# Altium footprint library WR-TBL_Pluggable Connector_3.50mm.PcbLib: 175 footprints (part 8 of 11)
Each footprint in its own frame and in the unit in brackets; x right, y up, seen from the top. Pads: shape width x height; smd on the part's side, far side on the other; paste and mask are expansions set on the pad; w line width, h text height; cw(c..) or ccw(c..) is an arc to the next point about the centre after c.
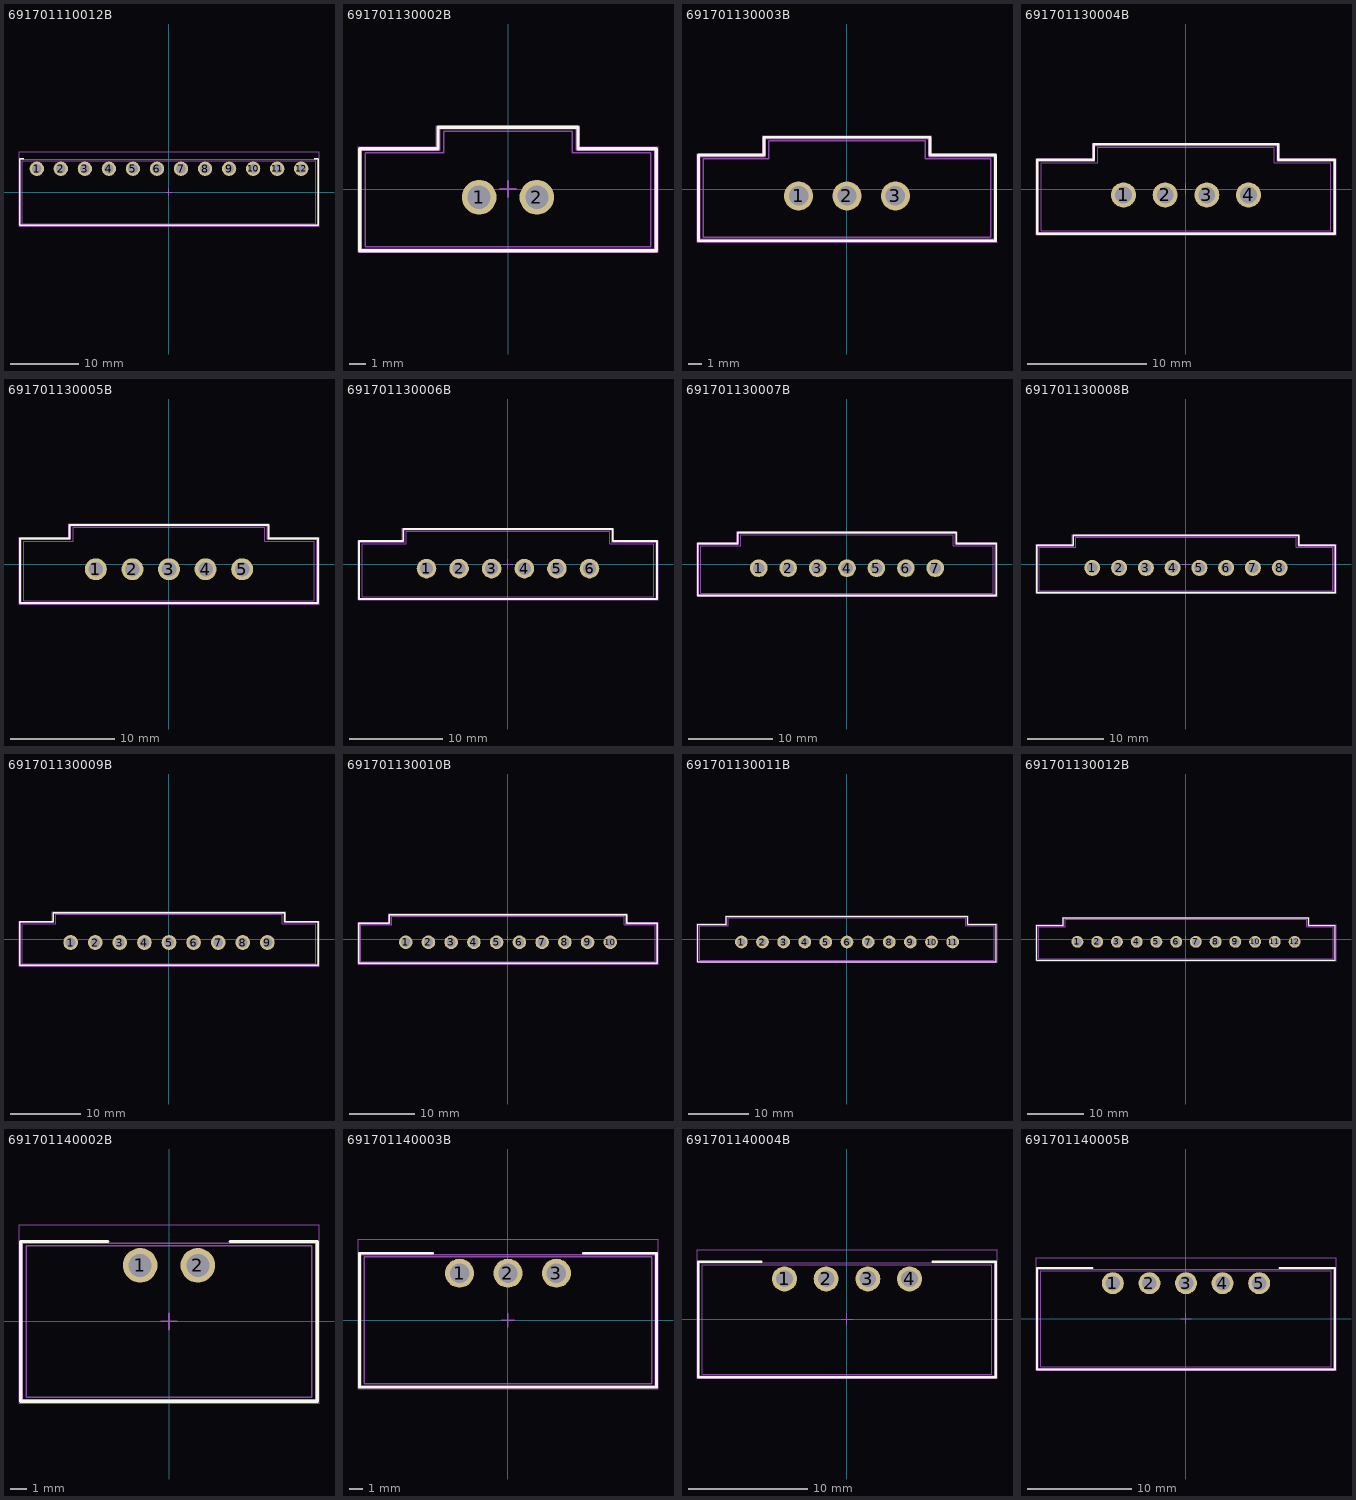
[diagram p7: the footprints below, top view; thin cyan lines are the x and y axes]

## 691701110012B [mm] "3.50 mm Horizontal PCB Header THR type, 12p"
height 7
pads (12):
  round 2.1 hole 1.4: 1(-19.25,3.4) 2(-15.75,3.4) 3(-12.25,3.4) 4(-8.75,3.4) 5(-5.25,3.4) 6(-1.75,3.4) 7(1.75,3.4) 8(5.25,3.4) 9(8.75,3.4) 10(12.25,3.4) 11(15.75,3.4) 12(19.25,3.4)
Top Overlay:
  lines w0.2: -21.15,4.85 -21.75,4.85 -21.75,-4.85 21.75,-4.85 21.75,4.85 21.15,4.85
Top Paste:
  region: 17.7,5.65 20.8,5.65 20.8,1.15 17.7,1.15
  region: 14.2,5.65 17.3,5.65 17.3,1.15 14.2,1.15
  region: 10.7,5.65 13.8,5.65 13.8,1.15 10.7,1.15
  region: 7.2,5.65 10.3,5.65 10.3,1.15 7.2,1.15
  region: 3.7,5.65 6.8,5.65 6.8,1.15 3.7,1.15
  region: 0.2,5.65 3.3,5.65 3.3,1.15 0.2,1.15
  region: -3.3,5.65 -0.2,5.65 -0.2,1.15 -3.3,1.15
  region: -6.8,5.65 -3.7,5.65 -3.7,1.15 -6.8,1.15
  region: -10.3,5.65 -7.2,5.65 -7.2,1.15 -10.3,1.15
  region: -17.3,5.65 -14.2,5.65 -14.2,1.15 -17.3,1.15
  region: -20.8,5.65 -17.7,5.65 -17.7,1.15 -20.8,1.15
  region: -13.8,5.65 -10.7,5.65 -10.7,1.15 -13.8,1.15
Assembly Notes:
  text "Stencil thickness : 120 μm" at -5.156,-5.651 h1
Top Assembly:
  lines w0.1: -21.65,-4.75 -21.65,4.75 21.65,4.75 21.65,-4.75 -21.65,-4.75
Top Designator:
  text ".Designator" at -3.647,-0.357 h1
Top 3D Body:
  lines w0.1: -21.4,-4.6 21.4,-4.6 21.4,4.6 -21.4,4.6 -21.4,-4.6
Top Courtyard:
  lines w0.05: -21.85,-4.95 21.85,-4.95 21.85,5.85 -21.85,5.85 -21.85,-4.95
Top Component Center:
  lines w0.1: -0.5,0 0.5,0 ; 0,-0.5 0,0.5
3D body "691701110012B.stp": height 7.05, standoff -2.55, extent -21.6,-4.6 21.6,4.6

## 691701130002B [mm] "3.50 mm Vertical PCB Header THR type with Flanges, 02p"
height 9.2
pads (2):
  round 2.1 hole 1.4: 1(-1.75,-0.5) 2(1.75,-0.5)
Top Overlay:
  lines w0.2: -9,-3.75 -9,2.45 -4.25,2.45 -4.25,3.75 4.25,3.75 4.25,2.45 9,2.45 9,-3.75 -9,-3.75
Top Paste:
  region: 0.2,1.75 3.3,1.75 3.3,-2.75 0.2,-2.75
  region: -3.3,1.75 -0.2,1.75 -0.2,-2.75 -3.3,-2.75
Assembly Notes:
  text "Stencil thickness : 120 μm" at -5.156,-4.551 h1
Top Assembly:
  lines w0.1: -8.9,-3.65 -8.9,2.35 -4.15,2.35 -4.15,3.65 4.15,3.65 4.15,2.35 8.9,2.35 8.9,-3.65 -8.9,-3.65
Top Designator:
  text ".Designator" at -3.647,-0.357 h1
Top 3D Body:
  lines w0.1: -8.65,-3.5 -8.65,2.2 -3.9,2.2 -3.9,3.5 3.9,3.5 3.9,2.2 8.65,2.2 8.65,-3.5 -8.65,-3.5
Top Courtyard:
  lines w0.05: -9.1,-3.85 -9.1,2.55 -4.35,2.55 -4.35,3.85 4.35,3.85 4.35,2.55 9.1,2.55 9.1,-3.85 -9.1,-3.85
Top Component Center:
  lines w0.1: -0.5,0 0.5,0 ; 0,-0.5 0,0.5
3D body "691701130002B.stp": height 9.26, standoff -2.55, extent -8.65,-3.5 8.65,3.5

## 691701130003B [mm] "3.50 mm Vertical PCB Header THR type with Flanges, 03p"
height 9.2
pads (3):
  round 2.1 hole 1.4: 1(-3.5,-0.5) 2(0,-0.5) 3(3.5,-0.5)
Top Overlay:
  lines w0.2: -10.75,-3.75 10.75,-3.75 10.75,2.45 6,2.45 6,3.75 -6,3.75 -6,2.45 -10.75,2.45 -10.75,-3.75
Top Paste:
  region: 1.95,1.75 5.05,1.75 5.05,-2.75 1.95,-2.75
  region: -5.05,1.75 -1.95,1.75 -1.95,-2.75 -5.05,-2.75
  region: -1.55,1.75 1.55,1.75 1.55,-2.75 -1.55,-2.75
Assembly Notes:
  text "Stencil thickness : 120 μm" at -5.156,-4.551 h1
Top Assembly:
  lines w0.1: -10.65,-3.65 10.65,-3.65 10.65,2.35 5.9,2.35 5.9,3.65 -5.9,3.65 -5.9,2.35 -10.65,2.35 -10.65,-3.65
Top Designator:
  text ".Designator" at -3.647,-0.357 h1
Top 3D Body:
  lines w0.1: -10.4,-3.5 10.4,-3.5 10.4,2.2 5.65,2.2 5.65,3.5 -5.65,3.5 -5.65,2.2 -10.4,2.2 -10.4,-3.5
Top Courtyard:
  lines w0.05: -10.85,-3.85 10.85,-3.85 10.85,2.55 6.1,2.55 6.1,3.85 -6.1,3.85 -6.1,2.55 -10.85,2.55 -10.85,-3.85
Top Component Center:
  lines w0.1: -0.5,0 0.5,0 ; 0,-0.5 0,0.5
3D body "691701130003B.stp": height 9.26, standoff -2.55, extent -10.4,-3.5 10.4,3.5

## 691701130004B [mm] "3.50 mm Vertical PCB Header THR type with Flanges, 04p"
height 9.2
pads (4):
  round 2.1 hole 1.4: 1(-5.25,-0.5) 2(-1.75,-0.5) 3(1.75,-0.5) 4(5.25,-0.5)
Top Overlay:
  lines w0.2: -12.5,-3.75 -12.5,2.45 -7.75,2.45 -7.75,3.75 7.75,3.75 7.75,2.45 12.5,2.45 12.5,-3.75 -12.5,-3.75
Top Paste:
  region: 3.7,1.75 6.8,1.75 6.8,-2.75 3.7,-2.75
  region: -3.3,1.75 -0.2,1.75 -0.2,-2.75 -3.3,-2.75
  region: -6.8,1.75 -3.7,1.75 -3.7,-2.75 -6.8,-2.75
  region: 0.2,1.75 3.3,1.75 3.3,-2.75 0.2,-2.75
Assembly Notes:
  text "Stencil thickness : 120 μm" at -5.156,-4.551 h1
Top Assembly:
  lines w0.1: -12.4,-3.65 -12.4,2.35 -7.65,2.35 -7.65,3.65 7.65,3.65 7.65,2.35 12.4,2.35 12.4,-3.65 -12.4,-3.65
Top Designator:
  text ".Designator" at -3.647,-0.357 h1
Top 3D Body:
  lines w0.1: -12.15,-3.5 -12.15,2.2 -7.4,2.2 -7.4,3.5 7.4,3.5 7.4,2.2 12.15,2.2 12.15,-3.5 -12.15,-3.5
Top Courtyard:
  lines w0.05: -12.6,-3.85 -12.6,2.55 -7.85,2.55 -7.85,3.85 7.85,3.85 7.85,2.55 12.6,2.55 12.6,-3.85 -12.6,-3.85
Top Component Center:
  lines w0.1: -0.5,0 0.5,0 ; 0,-0.5 0,0.5
3D body "691701130004B.stp": height 9.26, standoff -2.55, extent -12.15,-3.5 12.15,3.5

## 691701130005B [mm] "3.50 mm Vertical PCB Header THR type with Flanges, 05p"
height 9.2
pads (5):
  round 2.1 hole 1.4: 1(-7,-0.5) 2(-3.5,-0.5) 3(0,-0.5) 4(3.5,-0.5) 5(7,-0.5)
Top Overlay:
  lines w0.2: -14.25,-3.75 14.25,-3.75 14.25,2.45 9.5,2.45 9.5,3.75 -9.5,3.75 -9.5,2.45 -14.25,2.45 -14.25,-3.75
Top Paste:
  region: -1.55,1.75 1.55,1.75 1.55,-2.75 -1.55,-2.75
  region: -8.55,1.75 -5.45,1.75 -5.45,-2.75 -8.55,-2.75
  region: -5.05,1.75 -1.95,1.75 -1.95,-2.75 -5.05,-2.75
  region: 1.95,1.75 5.05,1.75 5.05,-2.75 1.95,-2.75
  region: 5.45,1.75 8.55,1.75 8.55,-2.75 5.45,-2.75
Assembly Notes:
  text "Stencil thickness : 120 μm" at -5.156,-4.551 h1
Top Assembly:
  lines w0.1: -14.15,-3.65 14.15,-3.65 14.15,2.35 9.4,2.35 9.4,3.65 -9.4,3.65 -9.4,2.35 -14.15,2.35 -14.15,-3.65
Top Designator:
  text ".Designator" at -3.647,-0.357 h1
Top 3D Body:
  lines w0.1: -13.9,-3.5 13.9,-3.5 13.9,2.2 9.15,2.2 9.15,3.5 -9.15,3.5 -9.15,2.2 -13.9,2.2 -13.9,-3.5
Top Courtyard:
  lines w0.05: -14.35,-3.85 14.35,-3.85 14.35,2.55 9.6,2.55 9.6,3.85 -9.6,3.85 -9.6,2.55 -14.35,2.55 -14.35,-3.85
Top Component Center:
  lines w0.1: -0.5,0 0.5,0 ; 0,-0.5 0,0.5
3D body "691701130005B.stp": height 9.26, standoff -2.55, extent -13.9,-3.5 13.9,3.5

## 691701130006B [mm] "3.50 mm Vertical PCB Header THR type with Flanges, 06p"
height 9.2
pads (6):
  round 2.1 hole 1.4: 1(-8.75,-0.5) 2(-5.25,-0.5) 3(-1.75,-0.5) 4(1.75,-0.5) 5(5.25,-0.5) 6(8.75,-0.5)
Top Overlay:
  lines w0.2: -16,-3.75 16,-3.75 16,2.45 11.25,2.45 11.25,3.75 -11.25,3.75 -11.25,2.45 -16,2.45 -16,-3.75
Top Paste:
  region: 7.2,1.75 10.3,1.75 10.3,-2.75 7.2,-2.75
  region: 3.7,1.75 6.8,1.75 6.8,-2.75 3.7,-2.75
  region: 0.2,1.75 3.3,1.75 3.3,-2.75 0.2,-2.75
  region: -6.8,1.75 -3.7,1.75 -3.7,-2.75 -6.8,-2.75
  region: -10.3,1.75 -7.2,1.75 -7.2,-2.75 -10.3,-2.75
  region: -3.3,1.75 -0.2,1.75 -0.2,-2.75 -3.3,-2.75
Assembly Notes:
  text "Stencil thickness : 120 μm" at -5.156,-4.551 h1
Top Assembly:
  lines w0.1: -15.9,-3.65 15.9,-3.65 15.9,2.35 11.15,2.35 11.15,3.65 -11.15,3.65 -11.15,2.35 -15.9,2.35 -15.9,-3.65
Top Designator:
  text ".Designator" at -3.647,-0.357 h1
Top 3D Body:
  lines w0.1: -15.65,-3.5 15.65,-3.5 15.65,2.2 10.9,2.2 10.9,3.5 -10.9,3.5 -10.9,2.2 -15.65,2.2 -15.65,-3.5
Top Courtyard:
  lines w0.05: -16.1,-3.85 16.1,-3.85 16.1,2.55 11.35,2.55 11.35,3.85 -11.35,3.85 -11.35,2.55 -16.1,2.55 -16.1,-3.85
Top Component Center:
  lines w0.1: -0.5,0 0.5,0 ; 0,-0.5 0,0.5
3D body "691701130006B.stp": height 9.26, standoff -2.55, extent -15.65,-3.5 15.65,3.5

## 691701130007B [mm] "3.50 mm Vertical PCB Header THR type with Flanges, 07p"
height 9.2
pads (7):
  round 2.1 hole 1.4: 1(-10.5,-0.5) 2(-7,-0.5) 3(-3.5,-0.5) 4(0,-0.5) 5(3.5,-0.5) 6(7,-0.5) 7(10.5,-0.5)
Top Overlay:
  lines w0.2: -17.75,-3.75 -17.75,2.45 -13,2.45 -13,3.75 13,3.75 13,2.45 17.75,2.45 17.75,-3.75 -17.75,-3.75
Top Paste:
  region: 8.95,1.75 12.05,1.75 12.05,-2.75 8.95,-2.75
  region: 5.45,1.75 8.55,1.75 8.55,-2.75 5.45,-2.75
  region: 1.95,1.75 5.05,1.75 5.05,-2.75 1.95,-2.75
  region: -1.55,1.75 1.55,1.75 1.55,-2.75 -1.55,-2.75
  region: -8.55,1.75 -5.45,1.75 -5.45,-2.75 -8.55,-2.75
  region: -12.05,1.75 -8.95,1.75 -8.95,-2.75 -12.05,-2.75
  region: -5.05,1.75 -1.95,1.75 -1.95,-2.75 -5.05,-2.75
Assembly Notes:
  text "Stencil thickness : 120 μm" at -5.156,-4.551 h1
Top Assembly:
  lines w0.1: -17.65,-3.65 -17.65,2.35 -12.9,2.35 -12.9,3.65 12.9,3.65 12.9,2.35 17.65,2.35 17.65,-3.65 -17.65,-3.65
Top Designator:
  text ".Designator" at -3.647,-0.357 h1
Top 3D Body:
  lines w0.1: -17.4,-3.5 -17.4,2.2 -12.65,2.2 -12.65,3.5 12.65,3.5 12.65,2.2 17.4,2.2 17.4,-3.5 -17.4,-3.5
Top Courtyard:
  lines w0.05: -17.85,-3.85 -17.85,2.55 -13.1,2.55 -13.1,3.85 13.1,3.85 13.1,2.55 17.85,2.55 17.85,-3.85 -17.85,-3.85
Top Component Center:
  lines w0.1: -0.5,0 0.5,0 ; 0,-0.5 0,0.5
3D body "691701130007B.stp": height 9.26, standoff -2.55, extent -17.4,-3.5 17.4,3.5

## 691701130008B [mm] "3.50 mm Vertical PCB Header THR type with Flanges, 08p"
height 9.2
pads (8):
  round 2.1 hole 1.4: 1(-12.25,-0.5) 2(-8.75,-0.5) 3(-5.25,-0.5) 4(-1.75,-0.5) 5(1.75,-0.5) 6(5.25,-0.5) 7(8.75,-0.5) 8(12.25,-0.5)
Top Overlay:
  lines w0.2: -19.5,-3.75 -19.5,2.45 -14.75,2.45 -14.75,3.75 14.75,3.75 14.75,2.45 19.5,2.45 19.5,-3.75 -19.5,-3.75
Top Paste:
  region: 10.7,1.75 13.8,1.75 13.8,-2.75 10.7,-2.75
  region: 7.2,1.75 10.3,1.75 10.3,-2.75 7.2,-2.75
  region: 3.7,1.75 6.8,1.75 6.8,-2.75 3.7,-2.75
  region: 0.2,1.75 3.3,1.75 3.3,-2.75 0.2,-2.75
  region: -3.3,1.75 -0.2,1.75 -0.2,-2.75 -3.3,-2.75
  region: -10.3,1.75 -7.2,1.75 -7.2,-2.75 -10.3,-2.75
  region: -13.8,1.75 -10.7,1.75 -10.7,-2.75 -13.8,-2.75
  region: -6.8,1.75 -3.7,1.75 -3.7,-2.75 -6.8,-2.75
Assembly Notes:
  text "Stencil thickness : 120 μm" at -5.156,-4.551 h1
Top Assembly:
  lines w0.1: -19.4,-3.65 -19.4,2.35 -14.65,2.35 -14.65,3.65 14.65,3.65 14.65,2.35 19.4,2.35 19.4,-3.65 -19.4,-3.65
Top Designator:
  text ".Designator" at -3.647,-0.357 h1
Top 3D Body:
  lines w0.1: -19.15,-3.5 -19.15,2.2 -14.4,2.2 -14.4,3.5 14.4,3.5 14.4,2.2 19.15,2.2 19.15,-3.5 -19.15,-3.5
Top Courtyard:
  lines w0.05: -19.6,-3.85 -19.6,2.55 -14.85,2.55 -14.85,3.85 14.85,3.85 14.85,2.55 19.6,2.55 19.6,-3.85 -19.6,-3.85
Top Component Center:
  lines w0.1: -0.5,0 0.5,0 ; 0,-0.5 0,0.5
3D body "691701130008B.stp": height 9.26, standoff -2.55, extent -19.15,-3.5 19.15,3.5

## 691701130009B [mm] "3.50 mm Vertical PCB Header THR type with Flanges, 09p"
height 9.2
pads (9):
  round 2.1 hole 1.4: 1(-14,-0.5) 2(-10.5,-0.5) 3(-7,-0.5) 4(-3.5,-0.5) 5(0,-0.5) 6(3.5,-0.5) 7(7,-0.5) 8(10.5,-0.5) 9(14,-0.5)
Top Overlay:
  lines w0.2: -21.25,-3.75 -21.25,2.45 -16.5,2.45 -16.5,3.75 16.5,3.75 16.5,2.45 21.25,2.45 21.25,-3.75 -21.25,-3.75
Top Paste:
  region: 12.45,1.75 15.55,1.75 15.55,-2.75 12.45,-2.75
  region: 8.95,1.75 12.05,1.75 12.05,-2.75 8.95,-2.75
  region: 5.45,1.75 8.55,1.75 8.55,-2.75 5.45,-2.75
  region: 1.95,1.75 5.05,1.75 5.05,-2.75 1.95,-2.75
  region: -1.55,1.75 1.55,1.75 1.55,-2.75 -1.55,-2.75
  region: -5.05,1.75 -1.95,1.75 -1.95,-2.75 -5.05,-2.75
  region: -12.05,1.75 -8.95,1.75 -8.95,-2.75 -12.05,-2.75
  region: -15.55,1.75 -12.45,1.75 -12.45,-2.75 -15.55,-2.75
  region: -8.55,1.75 -5.45,1.75 -5.45,-2.75 -8.55,-2.75
Assembly Notes:
  text "Stencil thickness : 120 μm" at -5.156,-4.551 h1
Top Assembly:
  lines w0.1: -21.15,-3.65 -21.15,2.35 -16.4,2.35 -16.4,3.65 16.4,3.65 16.4,2.35 21.15,2.35 21.15,-3.65 -21.15,-3.65
Top Designator:
  text ".Designator" at -3.647,-0.357 h1
Top 3D Body:
  lines w0.1: -20.9,-3.5 -20.9,2.2 -16.15,2.2 -16.15,3.5 16.15,3.5 16.15,2.2 20.9,2.2 20.9,-3.5 -20.9,-3.5
Top Courtyard:
  lines w0.05: -21.35,-3.85 -21.35,2.55 -16.6,2.55 -16.6,3.85 16.6,3.85 16.6,2.55 21.35,2.55 21.35,-3.85 -21.35,-3.85
Top Component Center:
  lines w0.1: -0.5,0 0.5,0 ; 0,-0.5 0,0.5
3D body "691701130009B.stp": height 9.26, standoff -2.55, extent -20.9,-3.5 20.9,3.5

## 691701130010B [mm] "3.50 mm Vertical PCB Header THR type with Flanges, 10p"
height 9.2
pads (10):
  round 2.1 hole 1.4: 1(-15.75,-0.5) 2(-12.25,-0.5) 3(-8.75,-0.5) 4(-5.25,-0.5) 5(-1.75,-0.5) 6(1.75,-0.5) 7(5.25,-0.5) 8(8.75,-0.5) 9(12.25,-0.5) 10(15.75,-0.5)
Top Overlay:
  lines w0.2: -23,-3.75 -23,2.45 -18.25,2.45 -18.25,3.75 18.25,3.75 18.25,2.45 23,2.45 23,-3.75 -23,-3.75
Top Paste:
  region: -10.3,1.75 -7.2,1.75 -7.2,-2.75 -10.3,-2.75
  region: -17.3,1.75 -14.2,1.75 -14.2,-2.75 -17.3,-2.75
  region: -13.8,1.75 -10.7,1.75 -10.7,-2.75 -13.8,-2.75
  region: -6.8,1.75 -3.7,1.75 -3.7,-2.75 -6.8,-2.75
  region: -3.3,1.75 -0.2,1.75 -0.2,-2.75 -3.3,-2.75
  region: 0.2,1.75 3.3,1.75 3.3,-2.75 0.2,-2.75
  region: 3.7,1.75 6.8,1.75 6.8,-2.75 3.7,-2.75
  region: 7.2,1.75 10.3,1.75 10.3,-2.75 7.2,-2.75
  region: 10.7,1.75 13.8,1.75 13.8,-2.75 10.7,-2.75
  region: 14.2,1.75 17.3,1.75 17.3,-2.75 14.2,-2.75
Assembly Notes:
  text "Stencil thickness : 120 μm" at -5.156,-4.551 h1
Top Assembly:
  lines w0.1: -22.9,-3.65 -22.9,2.35 -18.15,2.35 -18.15,3.65 18.15,3.65 18.15,2.35 22.9,2.35 22.9,-3.65 -22.9,-3.65
Top Designator:
  text ".Designator" at -3.647,-0.357 h1
Top 3D Body:
  lines w0.1: -22.65,-3.5 -22.65,2.2 -17.9,2.2 -17.9,3.5 17.9,3.5 17.9,2.2 22.65,2.2 22.65,-3.5 -22.65,-3.5
Top Courtyard:
  lines w0.05: -23.1,-3.85 -23.1,2.55 -18.35,2.55 -18.35,3.85 18.35,3.85 18.35,2.55 23.1,2.55 23.1,-3.85 -23.1,-3.85
Top Component Center:
  lines w0.1: -0.5,0 0.5,0 ; 0,-0.5 0,0.5
3D body "691701130010B.stp": height 9.26, standoff -2.55, extent -22.65,-3.5 22.65,3.5

## 691701130011B [mm] "3.50 mm Vertical PCB Header THR type with Flanges, 11p"
height 9.2
pads (11):
  round 2.1 hole 1.4: 1(-17.5,-0.5) 2(-14,-0.5) 3(-10.5,-0.5) 4(-7,-0.5) 5(-3.5,-0.5) 6(0,-0.5) 7(3.5,-0.5) 8(7,-0.5) 9(10.5,-0.5) 10(14,-0.5) 11(17.5,-0.5)
Top Overlay:
  lines w0.2: -24.75,-3.75 -24.75,2.45 -20,2.45 -20,3.75 20,3.75 20,2.45 24.75,2.45 24.75,-3.75 -24.75,-3.75
Top Paste:
  region: 15.95,1.75 19.05,1.75 19.05,-2.75 15.95,-2.75
  region: 12.45,1.75 15.55,1.75 15.55,-2.75 12.45,-2.75
  region: 8.95,1.75 12.05,1.75 12.05,-2.75 8.95,-2.75
  region: 5.45,1.75 8.55,1.75 8.55,-2.75 5.45,-2.75
  region: 1.95,1.75 5.05,1.75 5.05,-2.75 1.95,-2.75
  region: -1.55,1.75 1.55,1.75 1.55,-2.75 -1.55,-2.75
  region: -5.05,1.75 -1.95,1.75 -1.95,-2.75 -5.05,-2.75
  region: -8.55,1.75 -5.45,1.75 -5.45,-2.75 -8.55,-2.75
  region: -15.55,1.75 -12.45,1.75 -12.45,-2.75 -15.55,-2.75
  region: -19.05,1.75 -15.95,1.75 -15.95,-2.75 -19.05,-2.75
  region: -12.05,1.75 -8.95,1.75 -8.95,-2.75 -12.05,-2.75
Assembly Notes:
  text "Stencil thickness : 120 μm" at -5.156,-4.551 h1
Top Assembly:
  lines w0.1: -24.65,-3.65 -24.65,2.35 -19.9,2.35 -19.9,3.65 19.9,3.65 19.9,2.35 24.65,2.35 24.65,-3.65 -24.65,-3.65
Top Designator:
  text ".Designator" at -3.647,-0.357 h1
Top 3D Body:
  lines w0.1: -24.4,-3.5 -24.4,2.2 -19.65,2.2 -19.65,3.5 19.65,3.5 19.65,2.2 24.4,2.2 24.4,-3.5 -24.4,-3.5
Top Courtyard:
  lines w0.05: -24.85,-3.85 -24.85,2.55 -20.1,2.55 -20.1,3.85 20.1,3.85 20.1,2.55 24.85,2.55 24.85,-3.85 -24.85,-3.85
Top Component Center:
  lines w0.1: -0.5,0 0.5,0 ; 0,-0.5 0,0.5
3D body "691701130011B.stp": height 9.26, standoff -2.55, extent -24.4,-3.5 24.4,3.5

## 691701130012B [mm] "3.50 mm Vertical PCB Header THR type with Flanges, 12p"
height 9.2
pads (12):
  round 2.1 hole 1.4: 1(-19.25,-0.5) 2(-15.75,-0.5) 3(-12.25,-0.5) 4(-8.75,-0.5) 5(-5.25,-0.5) 6(-1.75,-0.5) 7(1.75,-0.5) 8(5.25,-0.5) 9(8.75,-0.5) 10(12.25,-0.5) 11(15.75,-0.5) 12(19.25,-0.5)
Top Overlay:
  lines w0.2: -26.5,-3.75 26.5,-3.75 26.5,2.45 21.75,2.45 21.75,3.75 -21.75,3.75 -21.75,2.45 -26.5,2.45 -26.5,-3.75
Top Paste:
  region: -13.8,1.75 -10.7,1.75 -10.7,-2.75 -13.8,-2.75
  region: -20.8,1.75 -17.7,1.75 -17.7,-2.75 -20.8,-2.75
  region: -17.3,1.75 -14.2,1.75 -14.2,-2.75 -17.3,-2.75
  region: -10.3,1.75 -7.2,1.75 -7.2,-2.75 -10.3,-2.75
  region: -6.8,1.75 -3.7,1.75 -3.7,-2.75 -6.8,-2.75
  region: -3.3,1.75 -0.2,1.75 -0.2,-2.75 -3.3,-2.75
  region: 0.2,1.75 3.3,1.75 3.3,-2.75 0.2,-2.75
  region: 3.7,1.75 6.8,1.75 6.8,-2.75 3.7,-2.75
  region: 7.2,1.75 10.3,1.75 10.3,-2.75 7.2,-2.75
  region: 10.7,1.75 13.8,1.75 13.8,-2.75 10.7,-2.75
  region: 14.2,1.75 17.3,1.75 17.3,-2.75 14.2,-2.75
  region: 17.7,1.75 20.8,1.75 20.8,-2.75 17.7,-2.75
Assembly Notes:
  text "Stencil thickness : 120 μm" at -5.156,-4.551 h1
Top Assembly:
  lines w0.1: -26.4,-3.65 26.4,-3.65 26.4,2.35 21.65,2.35 21.65,3.65 -21.65,3.65 -21.65,2.35 -26.4,2.35 -26.4,-3.65
Top Designator:
  text ".Designator" at -3.647,-0.357 h1
Top 3D Body:
  lines w0.1: -26.15,-3.5 26.15,-3.5 26.15,2.2 21.4,2.2 21.4,3.5 -21.4,3.5 -21.4,2.2 -26.15,2.2 -26.15,-3.5
Top Courtyard:
  lines w0.05: -26.6,-3.85 26.6,-3.85 26.6,2.55 21.85,2.55 21.85,3.85 -21.85,3.85 -21.85,2.55 -26.6,2.55 -26.6,-3.85
Top Component Center:
  lines w0.1: -0.5,0 0.5,0 ; 0,-0.5 0,0.5
3D body "691701130012B.stp": height 9.26, standoff -2.55, extent -26.15,-3.5 26.15,3.5

## 691701140002B [mm] "3.50 mm Horizontal PCB Header THR type with Flanges, 02p"
height 7
pads (2):
  round 2.1 hole 1.4: 1(-1.75,3.4) 2(1.75,3.4)
Top Overlay:
  lines w0.2: -3.7,4.85 -9,4.85 -9,-4.85 9,-4.85 9,4.85 3.7,4.85
Top Paste:
  region: 0.2,5.65 3.3,5.65 3.3,1.15 0.2,1.15
  region: -3.3,5.65 -0.2,5.65 -0.2,1.15 -3.3,1.15
Assembly Notes:
  text "Stencil thickness : 120 μm" at -5.156,-5.654 h1
Top Assembly:
  lines w0.1: -8.9,-4.75 -8.9,4.75 8.9,4.75 8.9,-4.75 -8.9,-4.75
Top Designator:
  text ".Designator" at -3.647,-0.357 h1
Top 3D Body:
  lines w0.1: -8.65,-4.6 -8.65,4.6 8.65,4.6 8.65,-4.6 -8.65,-4.6
Top Courtyard:
  lines w0.05: -9.1,-4.95 -9.1,5.85 9.1,5.85 9.1,-4.95 -9.1,-4.95
Top Component Center:
  lines w0.1: -0.5,0 0.5,0 ; 0,-0.5 0,0.5
3D body "691701140002B.stp": height 7.05, standoff -2.55, extent -8.65,-4.61 8.65,4.6

## 691701140003B [mm] "3.50 mm Horizontal PCB Header THR type with Flanges, 03p"
height 7
pads (3):
  round 2.1 hole 1.4: 1(-3.5,3.4) 2(0,3.4) 3(3.5,3.4)
Top Overlay:
  lines w0.2: -5.45,4.85 -10.75,4.85 -10.75,-4.85 10.75,-4.85 10.75,4.85 5.45,4.85
Top Paste:
  region: 1.95,5.65 5.05,5.65 5.05,1.15 1.95,1.15
  region: -1.55,5.65 1.55,5.65 1.55,1.15 -1.55,1.15
  region: -5.05,5.65 -1.95,5.65 -1.95,1.15 -5.05,1.15
Assembly Notes:
  text "Stencil thickness : 120 μm" at -5.156,-5.654 h1
Top Assembly:
  lines w0.1: -10.65,-4.75 -10.65,4.75 10.65,4.75 10.65,-4.75 -10.65,-4.75
Top Designator:
  text ".Designator" at -3.647,-0.357 h1
Top 3D Body:
  lines w0.1: -10.4,-4.6 -10.4,4.6 10.4,4.6 10.4,-4.6 -10.4,-4.6
Top Courtyard:
  lines w0.05: -10.85,-4.95 -10.85,5.85 10.85,5.85 10.85,-4.95 -10.85,-4.95
Top Component Center:
  lines w0.1: -0.5,0 0.5,0 ; 0,-0.5 0,0.5
3D body "691701140003B.stp": height 7.05, standoff -2.55, extent -10.4,-4.61 10.4,4.6

## 691701140004B [mm] "3.50 mm Horizontal PCB Header THR type with Flanges, 04p"
height 7
pads (4):
  round 2.1 hole 1.4: 1(-5.25,3.4) 2(-1.75,3.4) 3(1.75,3.4) 4(5.25,3.4)
Top Overlay:
  lines w0.2: -7.2,4.85 -12.5,4.85 -12.5,-4.85 12.5,-4.85 12.5,4.85 7.2,4.85
Top Paste:
  region: -6.8,5.65 -3.7,5.65 -3.7,1.15 -6.8,1.15
  region: -3.3,5.65 -0.2,5.65 -0.2,1.15 -3.3,1.15
  region: 0.2,5.65 3.3,5.65 3.3,1.15 0.2,1.15
  region: 3.7,5.65 6.8,5.65 6.8,1.15 3.7,1.15
Assembly Notes:
  text "Stencil thickness : 120 μm" at -5.156,-5.654 h1
Top Assembly:
  lines w0.1: -12.4,-4.75 12.4,-4.75 12.4,4.75 -12.4,4.75 -12.4,-4.75
Top Designator:
  text ".Designator" at -3.647,-0.357 h1
Top 3D Body:
  lines w0.1: -12.15,-4.6 12.15,-4.6 12.15,4.6 -12.15,4.6 -12.15,-4.6
Top Courtyard:
  lines w0.05: -12.6,-4.95 12.6,-4.95 12.6,5.85 -12.6,5.85 -12.6,-4.95
Top Component Center:
  lines w0.1: -0.5,0 0.5,0 ; 0,-0.5 0,0.5
3D body "691701140004B.stp": height 7.05, standoff -2.55, extent -12.15,-4.61 12.15,4.6

## 691701140005B [mm] "3.50 mm Horizontal PCB Header THR type with Flanges, 05p"
height 7
pads (5):
  round 2.1 hole 1.4: 1(-7,3.4) 2(-3.5,3.4) 3(0,3.4) 4(3.5,3.4) 5(7,3.4)
Top Overlay:
  lines w0.2: -8.95,4.85 -14.25,4.85 -14.25,-4.85 14.25,-4.85 14.25,4.85 8.95,4.85
Top Paste:
  region: 5.45,5.65 8.55,5.65 8.55,1.15 5.45,1.15
  region: 1.95,5.65 5.05,5.65 5.05,1.15 1.95,1.15
  region: -1.55,5.65 1.55,5.65 1.55,1.15 -1.55,1.15
  region: -5.05,5.65 -1.95,5.65 -1.95,1.15 -5.05,1.15
  region: -8.55,5.65 -5.45,5.65 -5.45,1.15 -8.55,1.15
Assembly Notes:
  text "Stencil thickness : 120 μm" at -5.156,-5.654 h1
Top Assembly:
  lines w0.1: -14.15,-4.75 14.15,-4.75 14.15,4.75 -14.15,4.75 -14.15,-4.75
Top Designator:
  text ".Designator" at -3.647,-0.357 h1
Top 3D Body:
  lines w0.1: -13.9,-4.6 13.9,-4.6 13.9,4.6 -13.9,4.6 -13.9,-4.6
Top Courtyard:
  lines w0.05: -14.35,-4.95 14.35,-4.95 14.35,5.85 -14.35,5.85 -14.35,-4.95
Top Component Center:
  lines w0.1: -0.5,0 0.5,0 ; 0,-0.5 0,0.5
3D body "691701140005B.stp": height 7.05, standoff -2.55, extent -13.9,-4.61 13.9,4.6